# Altium footprint library 拨码开关.PcbLib: 39 footprints (part 3 of 3)
Each footprint in its own frame and in the unit in brackets; x right, y up, seen from the top. Pads: shape width x height; smd on the part's side, far side on the other; paste and mask are expansions set on the pad; w line width, h text height; cw(c..) or ccw(c..) is an arc to the next point about the centre after c.
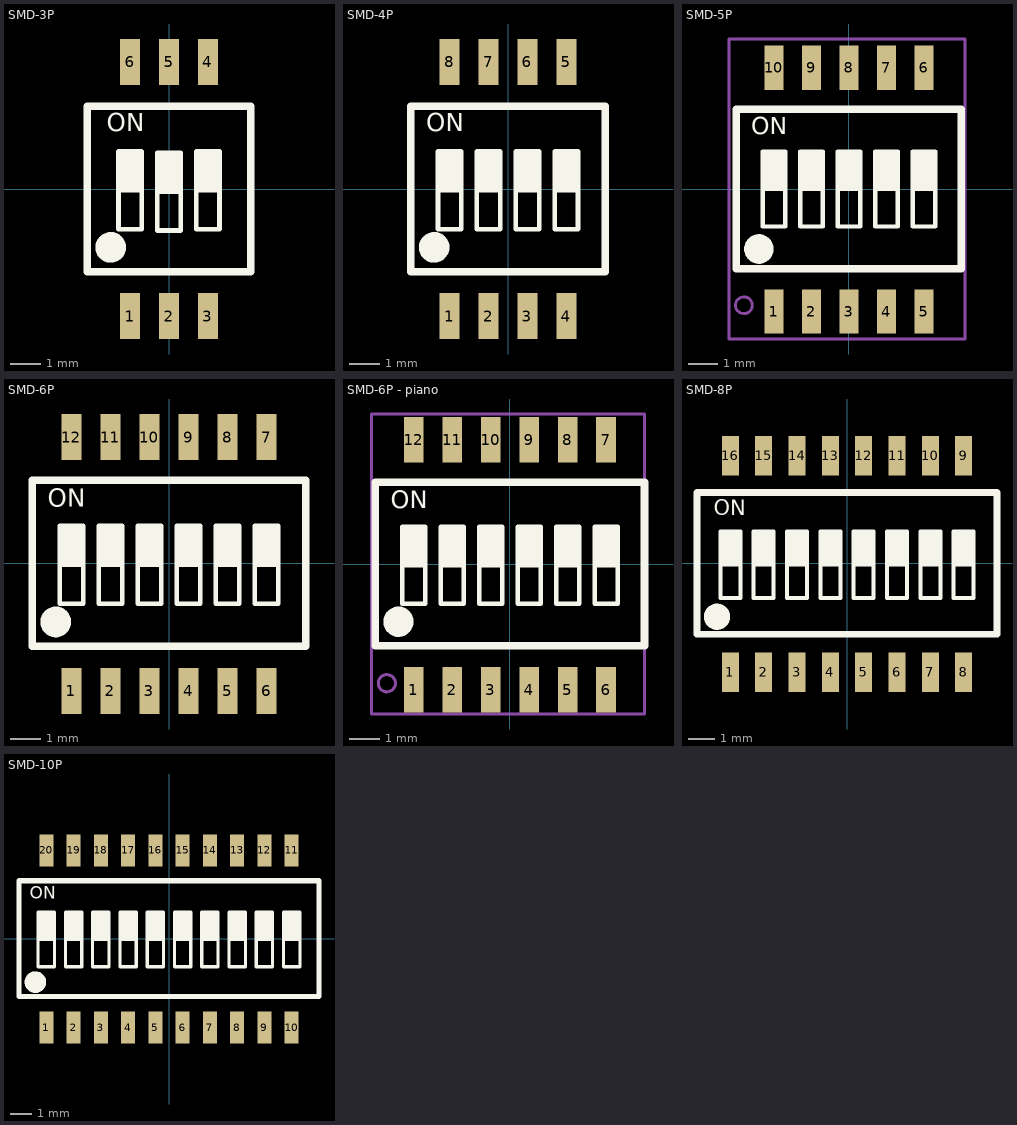
[diagram p2: the footprints below, top view; thin cyan lines are the x and y axes]

## SMD-3P [mm] "长：5.41mm，宽：5.4mm，高：2.3mm"
pads (6):
  rect 0.65x1.5 smd: 1(-1.27,-4.15) 2(0,-4.15) 3(1.27,-4.15) 4(1.27,4.15) 5(0,4.15) 6(-1.27,4.15)
Top Overlay:
  circle w0.5: c-1.905,-1.905 r0.25
  region: 1.651,1.225 0.889,1.225 0.889,-0.045 1.651,-0.045
  region: 0.381,1.184 -0.381,1.184 -0.381,-0.086 0.381,-0.086
  region: -0.889,1.225 -1.651,1.225 -1.651,-0.045 -0.889,-0.045
  lines w0.15: -1.651,-0.045 -0.889,-0.045 ; -0.381,-0.086 0.381,-0.086 ; 0.889,-0.045 1.651,-0.045 ; -1.651,-1.315 -1.651,1.225 -0.889,1.225 -0.889,-1.315 -1.651,-1.315 ; -0.381,-1.356 -0.381,1.184 0.381,1.184 0.381,-1.356 -0.381,-1.356 ; 0.889,-1.315 0.889,1.225 1.651,1.225 1.651,-1.315 0.889,-1.315
  lines w0.254: -2.667,-2.7 2.667,-2.7 2.667,2.7 -2.667,2.7 -2.667,-2.7
  text "ON" at -2.032,1.696 h1
3D body "SMD-3P.STEP": height 2.35, standoff 0, extent -2.743,-4.35 2.667,4.35

## SMD-4P [mm] "长：6.68mm，宽：5.4mm，高：2.3mm"
pads (8):
  rect 0.65x1.5 smd: 1(-1.905,-4.15) 2(-0.635,-4.15) 3(0.635,-4.15) 4(1.905,-4.15) 5(1.905,4.15) 6(0.635,4.15) 7(-0.635,4.15) 8(-1.905,4.15)
Top Overlay:
  circle w0.5: c-2.413,-1.905 r0.25
  region: -1.524,1.225 -2.286,1.225 -2.286,-0.045 -1.524,-0.045
  region: -0.254,1.225 -1.016,1.225 -1.016,-0.045 -0.254,-0.045
  region: 1.016,1.225 0.254,1.225 0.254,-0.045 1.016,-0.045
  region: 2.286,1.225 1.524,1.225 1.524,-0.045 2.286,-0.045
  lines w0.15: -2.286,-0.045 -1.524,-0.045 ; -1.016,-0.045 -0.254,-0.045 ; 0.254,-0.045 1.016,-0.045 ; 1.524,-0.045 2.286,-0.045 ; -2.286,-1.315 -1.524,-1.315 -1.524,1.225 -2.286,1.225 -2.286,-1.315 ; -1.016,-1.315 -0.254,-1.315 -0.254,1.225 -1.016,1.225 -1.016,-1.315 ; 0.254,-1.315 1.016,-1.315 1.016,1.225 0.254,1.225 0.254,-1.315 ; 1.524,-1.315 2.286,-1.315 2.286,1.225 1.524,1.225 1.524,-1.315
  lines w0.254: -3.175,-2.7 -3.175,2.7 3.175,2.7 3.175,-2.7 -3.175,-2.7
  text "ON" at -2.667,1.696 h1
3D body "SMD-4P.STEP": height 2.35, standoff 0, extent -3.378,-4.477 3.302,4.223

## SMD-5P [mm] "长：7.95mm，宽：5.4mm，高：2.3mm"
pads (10):
  rect 0.65x1.5 smd: 1(-2.54,-4.15) 2(-1.27,-4.15) 3(0,-4.15) 4(1.27,-4.15) 5(2.54,-4.15) 6(2.54,4.105) 7(1.27,4.105) 8(0,4.105) 9(-1.27,4.105) 10(-2.54,4.105)
Top Overlay:
  circle w0.5: c-3.048,-2.032 r0.25
  region: 0.381,1.27 -0.381,1.27 -0.381,0 0.381,0
  region: 2.921,1.27 2.159,1.27 2.159,0 2.921,0
  region: 1.651,1.27 0.889,1.27 0.889,0 1.651,0
  region: -0.889,1.27 -1.651,1.27 -1.651,0 -0.889,0
  region: -2.159,1.27 -2.921,1.27 -2.921,0 -2.159,0
  lines w0.15: -2.921,0 -2.159,0 ; -1.651,0 -0.889,0 ; -0.381,0 0.381,0 ; 0.889,0 1.651,0 ; 2.159,0 2.921,0 ; -2.921,-1.27 -2.921,1.27 -2.159,1.27 -2.159,-1.27 -2.921,-1.27 ; -1.651,-1.27 -1.651,1.27 -0.889,1.27 -0.889,-1.27 -1.651,-1.27 ; -0.381,-1.27 0.381,-1.27 0.381,1.27 -0.381,1.27 -0.381,-1.27 ; 0.889,-1.27 0.889,1.27 1.651,1.27 1.651,-1.27 0.889,-1.27 ; 2.159,-1.27 2.159,1.27 2.921,1.27 2.921,-1.27 2.159,-1.27
  lines w0.254: -3.81,-2.7 3.81,-2.7 3.81,2.7 -3.81,2.7 -3.81,-2.7
  text "ON" at -3.302,1.651 h1
Mechanical 15:
  circle w0.1: c-3.556,-3.937 r0.284
  lines w0.1: -4.064,-5.08 -4.064,5.08 3.937,5.08 3.937,-5.08 -4.064,-5.08
  text "'.Designator'" at -5.715,-0.635 h2
3D body "SMD-5P.STEP": height 2.35, standoff 0, extent -4.013,-4.191 3.937,4.509

## SMD-6P [mm] "长：9.22mm，宽：5.4mm，高：2.3mm"
pads (12):
  rect 0.65x1.5 smd: 1(-3.175,-4.15) 2(-1.905,-4.15) 3(-0.635,-4.15) 4(0.635,-4.15) 5(1.905,-4.15) 6(3.175,-4.15) 7(3.175,4.105) 8(1.905,4.105) 9(0.635,4.105) 10(-0.635,4.105) 11(-1.905,4.105) 12(-3.175,4.105)
Top Overlay:
  circle w0.5: c-3.683,-1.905 r0.25
  region: 3.556,1.225 2.794,1.225 2.794,-0.045 3.556,-0.045
  region: 2.286,1.225 1.524,1.225 1.524,-0.045 2.286,-0.045
  region: 1.016,1.225 0.254,1.225 0.254,-0.045 1.016,-0.045
  region: -0.254,1.225 -1.016,1.225 -1.016,-0.045 -0.254,-0.045
  region: -1.524,1.225 -2.286,1.225 -2.286,-0.045 -1.524,-0.045
  region: -2.794,1.225 -3.556,1.225 -3.556,-0.045 -2.794,-0.045
  lines w0.15: -3.556,-0.045 -2.794,-0.045 ; -2.286,-0.045 -1.524,-0.045 ; -1.016,-0.045 -0.254,-0.045 ; 0.254,-0.045 1.016,-0.045 ; 1.524,-0.045 2.286,-0.045 ; 2.794,-0.045 3.556,-0.045 ; -3.556,-1.315 -3.556,1.225 -2.794,1.225 -2.794,-1.315 -3.556,-1.315 ; -2.286,-1.315 -2.286,1.225 -1.524,1.225 -1.524,-1.315 -2.286,-1.315 ; -1.016,-1.315 -1.016,1.225 -0.254,1.225 -0.254,-1.315 -1.016,-1.315 ; 0.254,-1.315 0.254,1.225 1.016,1.225 1.016,-1.315 0.254,-1.315 ; 1.524,-1.315 1.524,1.225 2.286,1.225 2.286,-1.315 1.524,-1.315 ; 2.794,-1.315 2.794,1.225 3.556,1.225 3.556,-1.315 2.794,-1.315
  lines w0.254: -4.445,-2.7 4.445,-2.7 4.445,2.7 -4.445,2.7 -4.445,-2.7
  text "ON" at -3.937,1.651 h1
3D body "SMD-6P.STEP": height 2.35, standoff 0, extent -4.572,-4.35 4.648,4.35

## SMD-6P - piano [mm] "长：9.22mm，宽：5.4mm，高：2.3mm"
pads (12):
  rect 0.65x1.5 smd: 1(-3.175,-4.15) 2(-1.905,-4.15) 3(-0.635,-4.15) 4(0.635,-4.15) 5(1.905,-4.15) 6(3.175,-4.15) 7(3.175,4.105) 8(1.905,4.105) 9(0.635,4.105) 10(-0.635,4.105) 11(-1.905,4.105) 12(-3.175,4.105)
Top Overlay:
  circle w0.5: c-3.683,-1.905 r0.25
  region: 3.556,1.225 2.794,1.225 2.794,-0.045 3.556,-0.045
  region: 2.286,1.225 1.524,1.225 1.524,-0.045 2.286,-0.045
  region: 1.016,1.225 0.254,1.225 0.254,-0.045 1.016,-0.045
  region: -0.254,1.225 -1.016,1.225 -1.016,-0.045 -0.254,-0.045
  region: -1.524,1.225 -2.286,1.225 -2.286,-0.045 -1.524,-0.045
  region: -2.794,1.225 -3.556,1.225 -3.556,-0.045 -2.794,-0.045
  lines w0.15: -3.556,-0.045 -2.794,-0.045 ; -2.286,-0.045 -1.524,-0.045 ; -1.016,-0.045 -0.254,-0.045 ; 0.254,-0.045 1.016,-0.045 ; 1.524,-0.045 2.286,-0.045 ; 2.794,-0.045 3.556,-0.045 ; -3.556,-1.315 -3.556,1.225 -2.794,1.225 -2.794,-1.315 -3.556,-1.315 ; -2.286,-1.315 -2.286,1.225 -1.524,1.225 -1.524,-1.315 -2.286,-1.315 ; -1.016,-1.315 -1.016,1.225 -0.254,1.225 -0.254,-1.315 -1.016,-1.315 ; 0.254,-1.315 0.254,1.225 1.016,1.225 1.016,-1.315 0.254,-1.315 ; 1.524,-1.315 1.524,1.225 2.286,1.225 2.286,-1.315 1.524,-1.315 ; 2.794,-1.315 2.794,1.225 3.556,1.225 3.556,-1.315 2.794,-1.315
  lines w0.254: -4.445,-2.7 4.445,-2.7 4.445,2.7 -4.445,2.7 -4.445,-2.7
  text "ON" at -3.937,1.651 h1
Mechanical 15:
  circle w0.1: c-4.064,-3.937 r0.284
  lines w0.1: -4.572,-4.953 4.445,-4.953 4.445,4.953 -4.572,4.953 -4.572,-4.953
  text "'.Designator'" at -5.715,-0.762 h2
3D body "TDP06H1SBD1.stp": height 4.36, standoff -0.04, extent -4.35,-4.179 4.4,3.941

## SMD-8P [mm] "长：11.76mm，宽：5.4mm，高：2.3mm"
pads (16):
  rect 0.65x1.5 smd: 1(-4.445,-4.15) 2(-3.175,-4.15) 3(-1.905,-4.15) 4(-0.635,-4.15) 5(0.635,-4.15) 6(1.905,-4.15) 7(3.175,-4.15) 8(4.445,-4.15) 9(4.445,4.105) 10(3.175,4.105) 11(1.905,4.105) 12(0.635,4.105) 13(-0.635,4.105) 14(-1.905,4.105) 15(-3.175,4.105) 16(-4.445,4.105)
Top Overlay:
  circle w0.5: c-4.953,-2.032 r0.25
  region: 4.826,1.225 4.064,1.225 4.064,-0.045 4.826,-0.045
  region: 3.556,1.225 2.794,1.225 2.794,-0.045 3.556,-0.045
  region: 2.286,1.225 1.524,1.225 1.524,-0.045 2.286,-0.045
  region: 1.016,1.225 0.254,1.225 0.254,-0.045 1.016,-0.045
  region: -0.254,1.225 -1.016,1.225 -1.016,-0.045 -0.254,-0.045
  region: -1.524,1.225 -2.286,1.225 -2.286,-0.045 -1.524,-0.045
  region: -2.794,1.225 -3.556,1.225 -3.556,-0.045 -2.794,-0.045
  region: -4.064,1.225 -4.826,1.225 -4.826,-0.045 -4.064,-0.045
  lines w0.15: -4.826,-0.045 -4.064,-0.045 ; -3.556,-0.045 -2.794,-0.045 ; -2.286,-0.045 -1.524,-0.045 ; -1.016,-0.045 -0.254,-0.045 ; 0.254,-0.045 1.016,-0.045 ; 1.524,-0.045 2.286,-0.045 ; 2.794,-0.045 3.556,-0.045 ; 4.064,-0.045 4.826,-0.045 ; -4.826,-1.315 -4.826,1.225 -4.064,1.225 -4.064,-1.315 -4.826,-1.315 ; -3.556,-1.315 -3.556,1.225 -2.794,1.225 -2.794,-1.315 -3.556,-1.315 ; -2.286,-1.315 -2.286,1.225 -1.524,1.225 -1.524,-1.315 -2.286,-1.315 ; -1.016,-1.315 -1.016,1.225 -0.254,1.225 -0.254,-1.315 -1.016,-1.315 ; 0.254,-1.315 0.254,1.225 1.016,1.225 1.016,-1.315 0.254,-1.315 ; 1.524,-1.315 1.524,1.225 2.286,1.225 2.286,-1.315 1.524,-1.315 ; 2.794,-1.315 2.794,1.225 3.556,1.225 3.556,-1.315 2.794,-1.315 ; 4.064,-1.315 4.064,1.225 4.826,1.225 4.826,-1.315 4.064,-1.315
  lines w0.254: -5.715,-2.7 5.715,-2.7 5.715,2.7 -5.715,2.7 -5.715,-2.7
  text "ON" at -5.08,1.651 h1
3D body "SMD-8P.STEP": height 2.35, standoff 0, extent -5.842,-4.35 5.918,4.35

## SMD-10P [mm] "长：14.3mm，宽：5.4mm，高：2.3mm"
pads (20):
  rect 0.65x1.5 smd: 1(-5.715,-4.15) 2(-4.445,-4.15) 3(-3.175,-4.15) 4(-1.905,-4.15) 5(-0.635,-4.15) 6(0.635,-4.15) 7(1.905,-4.15) 8(3.175,-4.15) 9(4.445,-4.15) 10(5.715,-4.15) 11(5.715,4.105) 12(4.445,4.105) 13(3.175,4.105) 14(1.905,4.105) 15(0.635,4.105) 16(-0.635,4.105) 17(-1.905,4.105) 18(-3.175,4.105) 19(-4.445,4.105) 20(-5.715,4.105)
Top Overlay:
  circle w0.5: c-6.223,-2.032 r0.25
  region: -5.334,1.225 -6.096,1.225 -6.096,-0.045 -5.334,-0.045
  region: -4.064,1.225 -4.826,1.225 -4.826,-0.045 -4.064,-0.045
  region: -2.794,1.225 -3.556,1.225 -3.556,-0.045 -2.794,-0.045
  region: -1.524,1.225 -2.286,1.225 -2.286,-0.045 -1.524,-0.045
  region: -0.254,1.225 -1.016,1.225 -1.016,-0.045 -0.254,-0.045
  region: 1.016,1.225 0.254,1.225 0.254,-0.045 1.016,-0.045
  region: 2.286,1.225 1.524,1.225 1.524,-0.045 2.286,-0.045
  region: 3.556,1.225 2.794,1.225 2.794,-0.045 3.556,-0.045
  region: 4.826,1.225 4.064,1.225 4.064,-0.045 4.826,-0.045
  region: 6.096,1.225 5.334,1.225 5.334,-0.045 6.096,-0.045
  lines w0.15: -6.096,-0.045 -5.334,-0.045 ; -4.826,-0.045 -4.064,-0.045 ; -3.556,-0.045 -2.794,-0.045 ; -2.286,-0.045 -1.524,-0.045 ; -1.016,-0.045 -0.254,-0.045 ; 0.254,-0.045 1.016,-0.045 ; 1.524,-0.045 2.286,-0.045 ; 2.794,-0.045 3.556,-0.045 ; 4.064,-0.045 4.826,-0.045 ; 5.334,-0.045 6.096,-0.045 ; -6.096,-1.315 -5.334,-1.315 -5.334,1.225 -6.096,1.225 -6.096,-1.315 ; -4.826,-1.315 -4.064,-1.315 -4.064,1.225 -4.826,1.225 -4.826,-1.315 ; -3.556,-1.315 -2.794,-1.315 -2.794,1.225 -3.556,1.225 -3.556,-1.315 ; -2.286,-1.315 -1.524,-1.315 -1.524,1.225 -2.286,1.225 -2.286,-1.315 ; -1.016,-1.315 -0.254,-1.315 -0.254,1.225 -1.016,1.225 -1.016,-1.315 ; 0.254,-1.315 1.016,-1.315 1.016,1.225 0.254,1.225 0.254,-1.315 ; 1.524,-1.315 2.286,-1.315 2.286,1.225 1.524,1.225 1.524,-1.315 ; 2.794,-1.315 3.556,-1.315 3.556,1.225 2.794,1.225 2.794,-1.315 ; 4.064,-1.315 4.826,-1.315 4.826,1.225 4.064,1.225 4.064,-1.315 ; 5.334,-1.315 6.096,-1.315 6.096,1.225 5.334,1.225 5.334,-1.315
  lines w0.254: -6.985,-2.7 6.985,-2.7 6.985,2.7 -6.985,2.7 -6.985,-2.7
  text "ON" at -6.477,1.651 h1
3D body "SMD-10P.STEP": height 2.35, standoff 0, extent -7.112,-4.35 7.188,4.35